# Altium schematic symbol library Kh.SchLib: 9 symbols
Pins are listed as number, name and electrical type; pins without a type are passive.

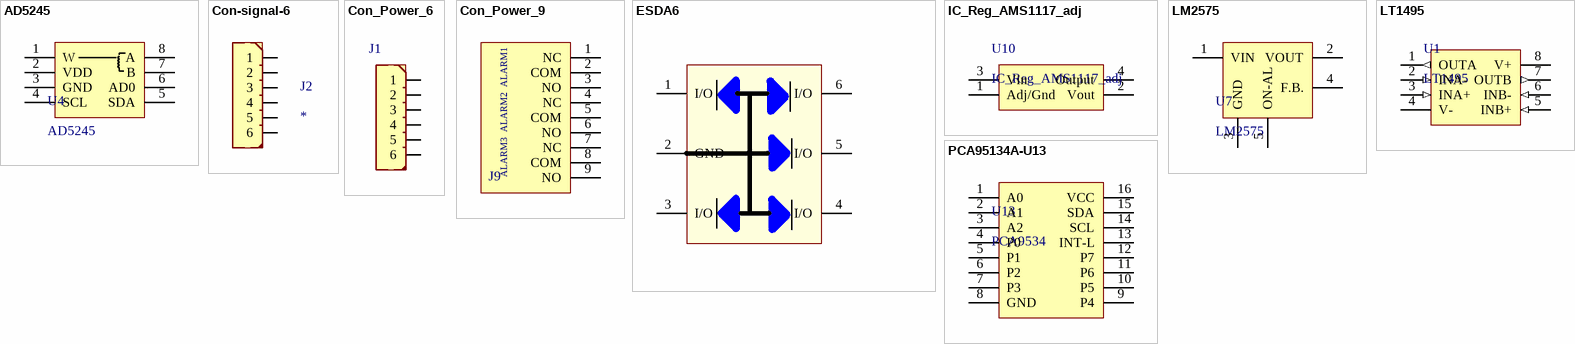
[diagram p0: symbols AD5245 to PCA95134A-U13]

## AD5245
designator U4
footprint SOIC-8-5*4 (SOIC, 8-Leads, Body 4.90x3.85mm, Pitch 1.27mm, IPC Medium Density)
pins: 1 W, 2 VDD, 3 GND, 4 SCL, 5 SDA, 6 AD0, 7 B, 8 A

## Con-signal-6
designator J2
SIGNAL CON
footprint CON-Sig-6
pins: 1, 2, 3, 4, 5, 6

## Con_Power_6
designator J1, comment 6'Pin  (value not drawn)
Power Connector 6'Pin; Rating: Rating?; Validation: Valid; Inflow: inflow?; Value: 6'Pin; Package: Package?; Type: Type?
footprint CON-Sig-6
pins: 1, 2, 3, 4, 5, 6

## Con_Power_9
designator J9, comment 9'Pin  (value not drawn)
Power Connector 9'Pin; Rating: Rating?; Validation: NT; Value: 9'Pin; Package: Package?; Type: Type?
footprint CON-9
pins: 1 NC, 2 COM, 3 NO, 4 NC, 5 COM, 6 NO, 7 NC, 8 COM, 9 NO
text: ALARM1; ALARM2; ALARM3

## ESDA6
designator U2
footprint SOT23-6 (SOT23, 6-Leads, Body 2.64x3.50mm, Pitch 0.95mm, IPC Medium Density)
pins: 1 I/O, 2 GND, 3 I/O, 4 I/O, 5 I/O, 6 I/O

## IC_Reg_AMS1117_adj
designator U10
Value: adj'V, 1'A; Rating: Rating?; Validation: NT; Inflow: 5224; Package: Package?; Type: Type?
footprint SOT223_M (SOT223, 4-Leads, Body 6.5x3.5mm, Pitch 2.3mm, Lead Span 7mm, IPC Low Density)
pins: 1 Adj/Gnd, 2 Vout, 3 Vin, 4 Output

## LM2575
designator U7
footprint TO-263
pins: 1 VIN, 2 VOUT, 3 GND, 4 F.B., 5 ON-AL

## LT1495
designator U1
footprint SOIC-8-5*4 (SOIC, 8-Leads, Body 4.90x3.85mm, Pitch 1.27mm, IPC Medium Density)
pins: 1 OUTA (out), 2 INA- (in), 3 INA+ (in), 4 V- (power), 5 INB+ (in), 6 INB- (in), 7 OUTB (out), 8 V+ (power)

## PCA95134A-U13
designator U13, comment PCA9534
footprint TSSOP16 (SOP, 16-Leads, Body 5.00x4.40mm, Pitch 0.65mm, IPC Medium Density)
pins: 1 A0, 2 A1, 3 A2, 4 P0, 5 P1, 6 P2, 7 P3, 8 GND, 9 P4, 10 P5, 11 P6, 12 P7, 13 INT-L, 14 SCL, 15 SDA, 16 VCC